# Altium schematic symbol library header-1x2.SchLib: 1 symbol
Pins are listed as number, name and electrical type; pins without a type are passive.

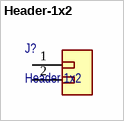
[diagram p0: symbol Header-1x2]

## Header-1x2
designator J?, comment Header 1x2
Single-row, 2-pin connector; Manufacturer: *; Manufacturer Part Number: *
footprint Header-1x2-THT-P2.54 (1x2 vertical male pin header, 2.54 mm pitch, plated through-hole, 2 positions.)
pins: 1, 2